# Altium schematic symbol library TPS48111LQDGXRQ1.SchLib: 1 symbol
Pins are listed as number, name and electrical type; pins without a type are passive.

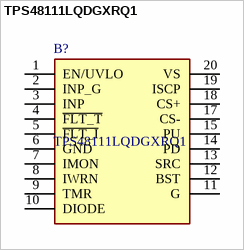
[diagram p0: symbol TPS48111LQDGXRQ1]

## TPS48111LQDGXRQ1
designator B?
TPS4811-Q1 100V Automotive Smart High-Side Driver With Protection and Diagnostics , 3.5V ~ 80V , 4A , 19-VSSOP ,-40C ~ 125C (TA); Manufacturer_Name: Texas Instruments; Geometry.Height: 1.1mm; Manufacturer_Part_Number: TPS48111LQDGXRQ1; Mouser Part Number: 595-TPS48111LQDGXRQ1; Mouser Price/Stock: https://www.mouser.co.uk/ProductDetail/Texas-Instruments/TPS48111LQDGXRQ1?qs=amGC7iS6iy%2Faisrr5sZ5WQ%3D%3D; Arrow Part Number: TPS48111LQDGXRQ1; Arrow Price/Stock: https://www.arrow.com/en/products/tps48111lqdgxrq1/texas-instruments.html?utm_currency=USD&region=nac; Datasheet Link: https://www.ti.com/lit/gpn/tps4811-q1
footprint TPS48111LQDGXRQ1
pins: 1 EN/UVLO, 2 INP_G, 3 INP, 4 ~{FLT_T}, 5 ~{FLT_I}, 6 GND, 7 IMON, 8 IWRN, 9 TMR, 10 DIODE, 11 G, 12 BST, 13 SRC, 14 PD, 15 PU, 17 CS-, 18 CS+, 19 ISCP, 20 VS